# EAGLE library part ICL7667 (library madhu)
Dual Inverting Power MOSFET Driver
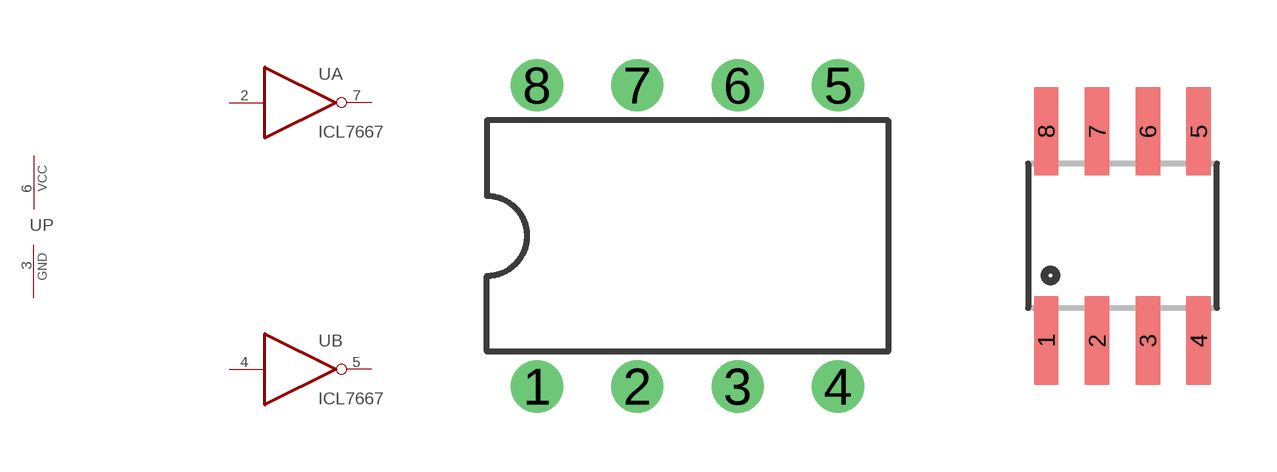
[diagram p3: symbol with the pads of DIL08; footprints DIL08, SOIC-8]

Designator prefix U; gates A=INVERTER B=INVERTER P=PWRN

## ICL7667CPA  [DIL08]
2  A:I  in
3  P:GND  pwr
4  B:I  in
5  B:O  out
6  P:VCC  pwr
7  A:O  out

## ICL7667CBA  [SOIC-8]
Pads as for DIL08

## Footprint DIL08 (pad centres in mm)
Dual In Line Package
drill 0.813 pad 1.27: 1 -3.81,-3.81; 2 -1.27,-3.81; 3 1.27,-3.81; 4 3.81,-3.81; 5 3.81,3.81; 6 1.27,3.81; 7 -1.27,3.81; 8 -3.81,3.81

## Footprint SOIC-8 (pad centres in mm)
Small Outline Package Fits JEDEC packages (narrow SOIC-8)
smd 0.61 x 2.21: 1 -1.905,-2.616; 2 -0.635,-2.616; 3 0.635,-2.616; 4 1.905,-2.616; 5 1.905,2.616; 6 0.635,2.616; 7 -0.635,2.616; 8 -1.905,2.616